# Altium integrated library ARC_Int_Lib.IntLib: 107 symbols (part 3 of 3)
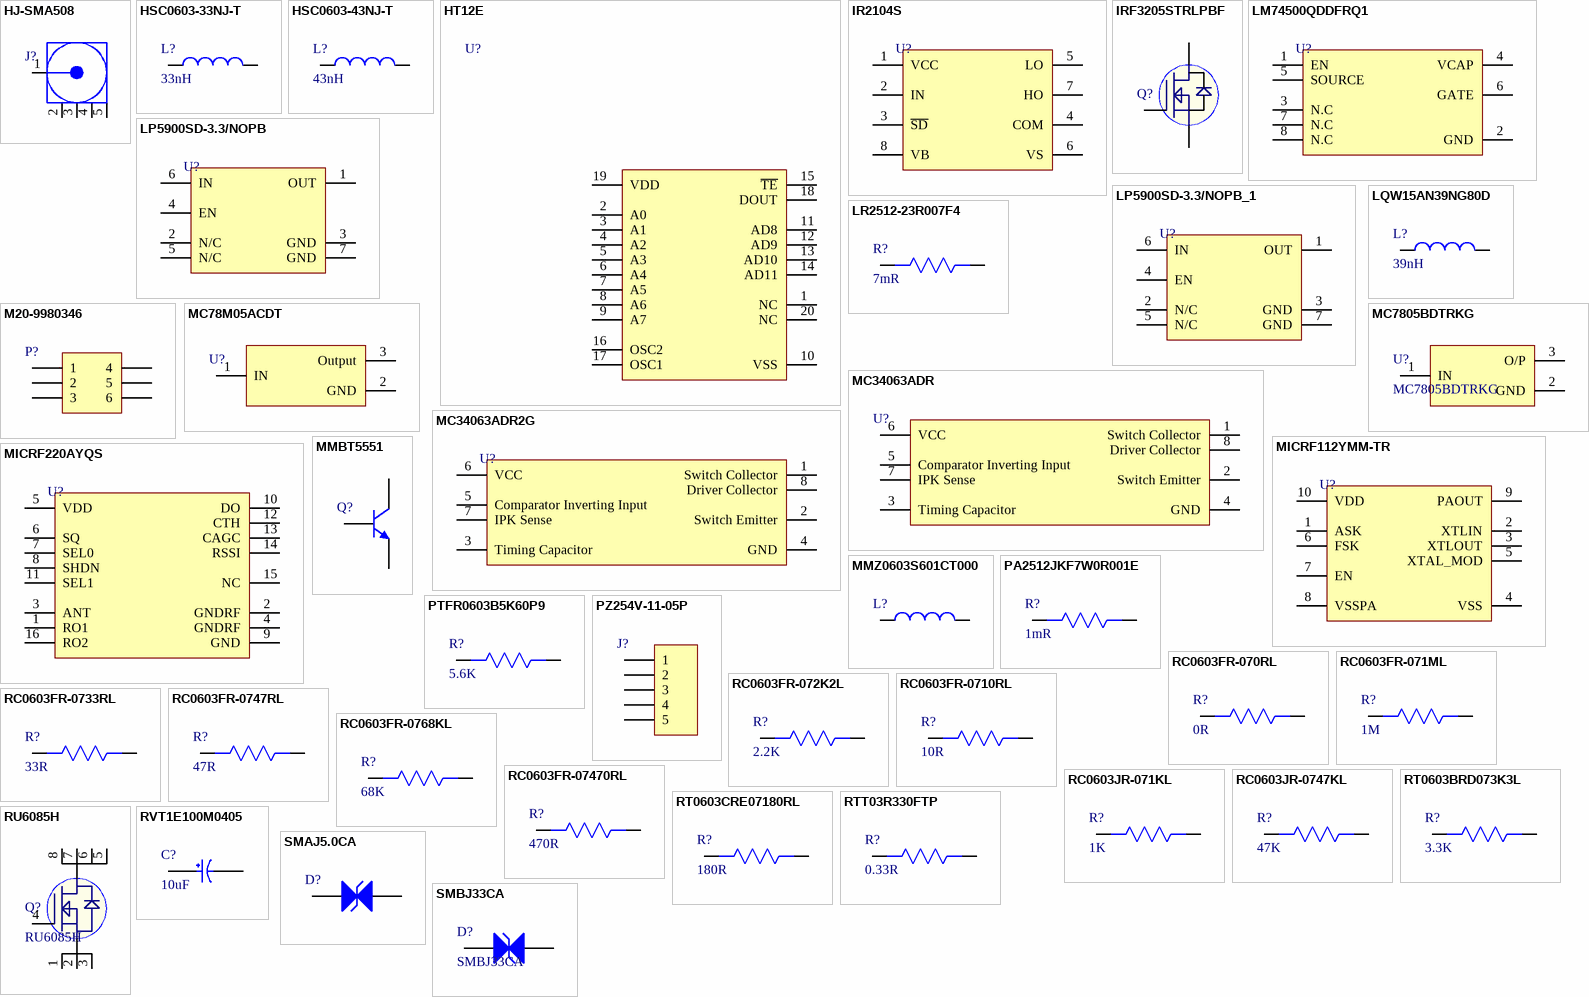
[diagram p4: symbols HJ-SMA508 to SMBJ33CA]

## RC0603FR-0768KL
designator R?, comment 68K
RES SMD 68K OHM 5% 1/10W 0603; Manufacturer: Yageo; Manufacturer Part Number: RC0603FR-0768KL; Power Rating: 100mW; Resistance: 68kR; Tolerance: 1%; Voltage Rating: 50V; Temperature Coefficient: 100ppm/°C; Supplier 1: Mouser; RoHS: Yes; Category: Chip SMD Resistors; Stock 1: 294889; Pricing 1: 1=0.10000, 10=0.01700, 50=0.01700, 100=0.00700, 1000=0.00400, 10000=0.00200 (USD); Case/Package: 0603; Number of Pins: 2; Case Code (Metric): 1608; Case Code (Imperial): 0603; Size Code: 0603; Min Operating Temperature: -55°C; Max Operating Temperature: 155°C; Package Quantity: 1; Packaging: Tape and Reel; Voltage Rating (DC): 50V; Resistor Type: Thick Film; Number of Terminations: 2; Termination: SMD/SMT; Max Power Dissipation: 100mW; Features: Moisture Resistant; Series: RC; Resistance Tolerance: 1%; Technology: THICK FILM; Length: 0.063inch; Width: 0.031inch; Height: 0.022inch; Depth: 0.8mm; RoHS Compliant: Yes; REACH SVHC: Unknown; Lead Free: Lead Free; ComponentLink1URL: https://datasheet.ciiva.com/11819/0900766b80f96399-11819412.pdf?src-supplier=RSComponents; ComponentLink1Description: https://datasheet.ciiva.com/11819/0900766b80f96399-11819412.pdf?src-supplier=RSComponents; ComponentLink2URL: https://datasheet.ciiva.com/7983/443971-7983658.pdf?src-supplier=Element14; ComponentLink2Description: https://datasheet.ciiva.com/7983/443971-7983658.pdf?src-supplier=Element14; ComponentLink3URL: https://datasheet.ciiva.com/46412/443971-46412855.pdf?src-supplier=Element14; ComponentLink3Description: https://datasheet.ciiva.com/46412/443971-46412855.pdf?src-supplier=Element14; ComponentLink4URL: https://datasheet.ciiva.com/2454/pyu-r-int-thick-7-2454148.pdf?src-supplier=Digi-Key; ComponentLink4Description: https://datasheet.ciiva.com/2454/pyu-r-int-thick-7-2454148.pdf?src-supplier=Digi-Key; ComponentLink5URL: https://datasheet.ciiva.com/2454/pyu-r-int-thick-7-2454149.pdf?src-supplier=Digi-Key; ComponentLink5Description: https://datasheet.ciiva.com/2454/pyu-r-int-thick-7-2454149.pdf?src-supplier=Digi-Key; ComponentLink6URL: https://datasheet.ciiva.com/2454/pyu-r-int-thick-7-2454147.pdf?src-supplier=Digi-Key; ComponentLink6Description: https://datasheet.ciiva.com/2454/pyu-r-int-thick-7-2454147.pdf?src-supplier=Digi-Key; ComponentLink7URL: https://datasheet.ciiva.com/7746/443971-7746391.pdf?src-supplier=Element14; ComponentLink7Description: https://datasheet.ciiva.com/7746/443971-7746391.pdf?src-supplier=Element14; ComponentLink8URL: https://datasheet.ciiva.com/7746/443971-7746390.pdf?src-supplier=Element14; ComponentLink8Description: https://datasheet.ciiva.com/7746/443971-7746390.pdf?src-supplier=Element14; Supplier Part Number 1: 603-RC0603FR-0768KL
footprint Res0603
pins: 1, 2

## RC0603FR-07470RL
designator R?, comment 470R
RES SMD 470 OHM 1% 1/10W 0603; Manufacturer: Yageo; Manufacturer Part Number: RC0603FR-07470RL; Power Rating: 100mW; Voltage Rating: 50V; Temperature Coefficient: 100ppm/°C; Working Voltage: 75V; Supplier 1: Digi-Key; Stock 1: 4530601; Pricing 1: 1=0.1, 10=0.023, 100=0.0094, 1000=0.00421, 2500=0.00366 (USD); Case/Package: 0603; Case Code (Metric): 1608; Case Code (Imperial): 0603; Min Operating Temperature: -55°C; Max Operating Temperature: 155°C; Tolerance: 1%; Resistance: 470R; Packaging: Tape and Reel; Package Quantity: 1; Composition: Thick Film; Number of Terminations: 2; Termination: SMD/SMT; Military Standard: Not; Max Power Dissipation: 100mW; Features: Moisture Resistant; Length: 1.6mm; Height: 0.022inch; Width: 0.031inch; Depth: 0.8mm; REACH SVHC: No SVHC; Lead Free: Lead Free; ComponentLink1URL: http://documents.rs-components.com/techlib://itc_doclist_GB.htm?stockno=5047341&src-supplier=RSComponents; ComponentLink1Description: http://documents.rs-components.com/techlib://itc_doclist_GB.htm?stockno=5047341&src-supplier=RSComponents; ComponentLink2URL: http://www.farnell.com/datasheets/1868787.pdf?src-supplier=Element14; ComponentLink2Description: http://www.farnell.com/datasheets/1868787.pdf?src-supplier=Element14; ComponentLink3URL: http://www.farnell.com/datasheets/2167052.pdf?src-supplier=Element14; ComponentLink3Description: http://www.farnell.com/datasheets/2167052.pdf?src-supplier=Element14; ComponentLink4URL: http://www.yageo.com/documents/recent/PYu-RC_Group_51_RoHS_L_10.pdf?src-supplier=Digi-Key; ComponentLink4Description: http://www.yageo.com/documents/recent/PYu-RC_Group_51_RoHS_L_10.pdf?src-supplier=Digi-Key; Supplier Part Number 1: 311-470HRCT-ND
footprint Res0603
pins: 1, 2

## RC0603JR-071KL
designator R?, comment 1K
RES SMD 1K OHM 5% 1/10W 0603; Manufacturer: Yageo; Manufacturer Part Number: RC0603JR-071KL; Resistance: 1kR; Temperature Coefficient: 100ppm/°C; Voltage Rating (DC): 50V; Power Rating: 100mW; Supplier 1: Digi-Key; Stock 1: 12490655; Pricing 1: 1=0.1, 10=0.018, 100=0.0072, 1000=0.00323, 2500=0.00281 (USD); Case/Package: 0603; Number of Pins: 2; Contact Plating: Tin,Matte; Case Code (Imperial): 0603; Case Code (Metric): 1608; Min Operating Temperature: -55°C; Max Operating Temperature: 155°C; Tolerance: 5%; Composition: Thick Film; Packaging: Tape and Reel; Package Quantity: 5000; Voltage Rating: 50V; Termination: SMD/SMT; Military Standard: Not; Length: 1.6mm; Height: 0.45mm; Width: 0.8mm; Depth: 0.8mm; Radiation Hardening: No; REACH SVHC: Unknown; Lead Free: Lead Free; ComponentLink1URL: http://www.yageo.com/documents/recent/PYu-RC_Group_51_RoHS_L_2.pdf?src-supplier=Avnet; ComponentLink1Description: http://www.yageo.com/documents/recent/PYu-RC_Group_51_RoHS_L_2.pdf?src-supplier=Avnet; ComponentLink2URL: http://www.farnell.com/datasheets/2167052.pdf?src-supplier=Element14; ComponentLink2Description: http://www.farnell.com/datasheets/2167052.pdf?src-supplier=Element14; ComponentLink3URL: http://www.farnell.com/datasheets/443971.pdf?src-supplier=Element14; ComponentLink3Description: http://www.farnell.com/datasheets/443971.pdf?src-supplier=Element14; ComponentLink4URL: http://www.farnell.com/datasheets/1868787.pdf?src-supplier=Element14; ComponentLink4Description: http://www.farnell.com/datasheets/1868787.pdf?src-supplier=Element14; Supplier Part Number 1: 311-1.0KGRCT-ND
footprint Res0603
pins: 1, 2

## RC0603JR-0747KL
designator R?, comment 47K
RES SMD 47K OHM 5% 1/10W 0603; Manufacturer: Yageo; Manufacturer Part Number: RC0603JR-0747KL; Resistance: 47kR; Power Rating: 100mW; Voltage Rating (DC): 50V; Temperature Coefficient: 100ppm/°C; Supplier 1: Arrow; Stock 1: 599135; Pricing 1: 5000=0.0025, 10000=0.0022, 25000=0.0019, 1=0.0011, 6000=0.001 (USD); Case/Package: 0603; Number of Pins: 2; Case Code (Imperial): 0603; Case Code (Metric): 1608; Min Operating Temperature: -55°C; Max Operating Temperature: 155°C; Packaging: Tape and Reel; Tolerance: 5%; Voltage Rating: 50V; Package Quantity: 5000; Termination: SMD/SMT; Military Standard: Not; Composition: Thick Film; Length: 1.6mm; Height: 0.45mm; Width: 0.8mm; Depth: 0.8mm; REACH SVHC: No SVHC; Lead Free: Lead Free; ComponentLink1URL: http://www.farnell.com/datasheets/443971.pdf; ComponentLink1Description: http://www.farnell.com/datasheets/443971.pdf; ComponentLink2URL: http://www.mouser.com/catalog/specsheets/RC0603.pdf; ComponentLink2Description: http://www.mouser.com/catalog/specsheets/RC0603.pdf; Supplier Part Number 1: RC0603JR-0747KL
footprint Res0603
pins: 1, 2

## RT0603BRD073K3L
designator R?, comment 3.3K
RES SMD 3.3K OHM 0.1% 1/10W 0603; Manufacturer: Yageo; Manufacturer Part Number: RT0603BRD073K3L; Resistance: 3.3kR; Power Rating: 100mW; Voltage Rating: 75V; Temperature Coefficient: 25ppm/°C; Voltage Rating (DC): 50V; Supplier 1: Newark; RoHS: Yes; Category: Chip SMD Resistors; Stock 1: 7026; Pricing 1: 1=0.26300, 10=0.16400, 25=0.12800, 50=0.09300, 100=0.05700 (USD); Case/Package: 0603; Case Code (Metric): 1608; Case Code (Imperial): 0603; Contact Plating: Tin,Lead; Min Operating Temperature: -55°C; Max Operating Temperature: 125°C; Package Quantity: 5000; Packaging: Tape and Reel; Tolerance: 0.1%; Resistor Type: Thin Film; Number of Terminations: 2; Termination: SMD/SMT; Max Power Dissipation: 100mW; Features: Moisture Resistant; Series: RT; Construction: Rectangular; Length: 0.063inch; Width: 0.031inch; Height: 0.022inch; Depth: 0.8mm; Military Standard: Not; Lead Free: Lead Free; RoHS Compliant: Yes; ComponentLink1URL: https://datasheet.ciiva.com/11814/0900766b8027bd26-11814026.pdf?src-supplier=RSComponents; ComponentLink1Description: https://datasheet.ciiva.com/11814/0900766b8027bd26-11814026.pdf?src-supplier=RSComponents; ComponentLink2URL: https://datasheet.ciiva.com/2585/pyu-rt-1-to-0-05-rohs-l-4-2585926.pdf?src-supplier=Digi-Key; ComponentLink2Description: https://datasheet.ciiva.com/2585/pyu-rt-1-to-0-05-rohs-l-4-2585926.pdf?src-supplier=Digi-Key; ComponentLink3URL: https://datasheet.ciiva.com/12694/pyu-rt-1-to-0-05-rohs-l-4-12694839.pdf?src-supplier=Mouser; ComponentLink3Description: https://datasheet.ciiva.com/12694/pyu-rt-1-to-0-05-rohs-l-4-12694839.pdf?src-supplier=Mouser; Supplier Part Number 1: 82AH8918
footprint Res0603
pins: 1, 2

## RT0603CRE07180RL
designator R?, comment 180R
100mW Thin Film Resistor 75V ±0.25% ±50ppm/℃ 180Ω -55℃~+155℃ 0603 Chip Resistor - Surface Mount ROHS; Manufacturer: YAGEO; Manufacturer Part Number: RT0603CRE07180RL; ComponentLink1Description: LCSC; ComponentLink1URL: https://lcsc.com/product-detail/Chip-span-style-background-color-ff0-Resistor-span-Surface-Mount_YAGEO-RT0603CRE07180RL_C705909.html; Footprint: 0603
footprint Res0603
pins: 1, 2

## RTT03R330FTP
designator R?, comment 0.33R
±1% 1/10W Thick Film Resistors 75V ±600ppm/℃ -55℃~+155℃ 0.33Ω 0603 Chip Resistor - Surface Mount ROHS; Manufacturer: RALEC; Manufacturer Part No: RTT03R330FTP; Value: 0.33Ω; Package: 0603
footprint Res0603
pins: 1, 2

## RU6085H
designator Q?
60V 80A 2.5W 7mΩ@10V,20A 3V@250μA N Channel SOP-8_150mil MOSFETs ROHS; Manufacturer: Shenzhen; Manufacturer Part No: RU6085H; Package: SOP-8_150mil; ComponentLink1Description: LCSC; ComponentLink1URL: https://lcsc.com/product-detail/MOSFETs_Shenzhen-ruichips-Semicon-RU6085H_C181990.html
footprint RU6085H
pins: 1 S, 2 S, 3 S, 4 G, 5 D, 6 D, 7 D, 8 D

## RVT1E100M0405
designator C?, comment 10uF
CAP ALUM 10uF 25V SMD; Manufacturer: ROQANG; φD: 4mm; L: 5.4mm; Tolerance: ±20%; Operating Temperature: -45℃~+105℃; Rated Voltage: 25V; Capacitance: 10uF
footprint RVT1E100M0405. (10uF 25V 5.4mm SMD)
pins: 1, 2

## SMAJ5.0CA
designator D?
43.5A 9.2V 6.4V 5V Bi-Directional SMA(DO-214AC) TVS ROHS; Manufacturer: Bourns; Manufacturer Part Number: SMAJ5.0CA; Breakdown Voltage: 7V; Polarity: Bidirectional; Peak Pulse Power: 400W; Test Current: 10mA; Element Configuration: Single; Max Surge Current: 40A; Max Reverse Leakage Current: 1.6mA; Number of Channels: 1; Power Line Protection: No; Diode Type: ZENER; ESD Protection: Yes; Supplier 1: RSComponents; RoHS: Yes; Category: TVS Diodes; Stock 1: 4825; Pricing 1: 5000=0.16400, 10000=0.16000, 15000=0.15600 (GBP); Mount: Surface Mount; Case/Package: DO-214AC; Number of Pins: 2; Contact Plating: Tin; Min Operating Temperature: -55°C; Max Operating Temperature: 150°C; Reverse Standoff Voltage: 5V; Clamping Voltage: 9.2V; Direction: Bidirectional; Packaging: Tape and Reel; Min Breakdown Voltage: 6.4V; Peak Pulse Current: 43.5A; Package Quantity: 1; Operating Supply Voltage: 5V; Max Power Dissipation: 400W; Termination: SMD/SMT; Reverse Breakdown Voltage: 6.4V; Max Breakdown Voltage: 7V; Number of Elements: 1; Leakage Current: 1.6mA; Number of Bidirectional Channels: 1; Resistor Type: Zener; Series: SMAJ; Radiation Hardening: No; RoHS Compliant: Yes; REACH SVHC: No SVHC; ComponentLink1URL: https://datasheet.ciiva.com/11336/smaj-11336795.pdf?src-supplier=Avnet; ComponentLink1Description: https://datasheet.ciiva.com/11336/smaj-11336795.pdf?src-supplier=Avnet; ComponentLink2URL: https://datasheet.ciiva.com/3022/smaj-3022286.pdf?src-supplier=Avnet; ComponentLink2Description: https://datasheet.ciiva.com/3022/smaj-3022286.pdf?src-supplier=Avnet; ComponentLink3URL: https://datasheet.ciiva.com/334/smaj-334523.pdf?src-supplier=Digi-Key; ComponentLink3Description: https://datasheet.ciiva.com/334/smaj-334523.pdf?src-supplier=Digi-Key; ComponentLink4URL: https://datasheet.ciiva.com/334/smaj-334524.pdf?src-supplier=Digi-Key; ComponentLink4Description: https://datasheet.ciiva.com/334/smaj-334524.pdf?src-supplier=Digi-Key; ComponentLink5URL: https://datasheet.ciiva.com/334/smaj-334522.pdf?src-supplier=Digi-Key; ComponentLink5Description: https://datasheet.ciiva.com/334/smaj-334522.pdf?src-supplier=Digi-Key; ComponentLink6URL: https://datasheet.ciiva.com/30090/smaj-30090141.pdf?src-supplier=Onlinecomponents.com; ComponentLink6Description: https://datasheet.ciiva.com/30090/smaj-30090141.pdf?src-supplier=Onlinecomponents.com; ComponentLink7URL: https://datasheet.ciiva.com/17413/smaj-17413550.pdf?; ComponentLink7Description: https://datasheet.ciiva.com/17413/smaj-17413550.pdf?; Supplier Part Number 1: 1742481
footprint SMA
pins: 1 A, 2 A

## SMBJ33CA
designator D?
11.3A 53.3V 36.7V 33V Bi-Directional SMB(DO-214AA) TVS ROHS; Manufacturer: Brightking Elec (TAIWAN); Package: DO-124AA; Maximum Clamping Voltage: 53.3V; Breakdown Voltage (Min): 36.7V; Reverse Stand-Off Voltage (Vrwm): 33V; Polarity: Bi-directional
footprint SMBJ33CA (11.3A 53.3V 36.7V 33V Bi-Directional SMB(DO-214AA) TVS ROHS)
pins: 1 A1, 2 A2

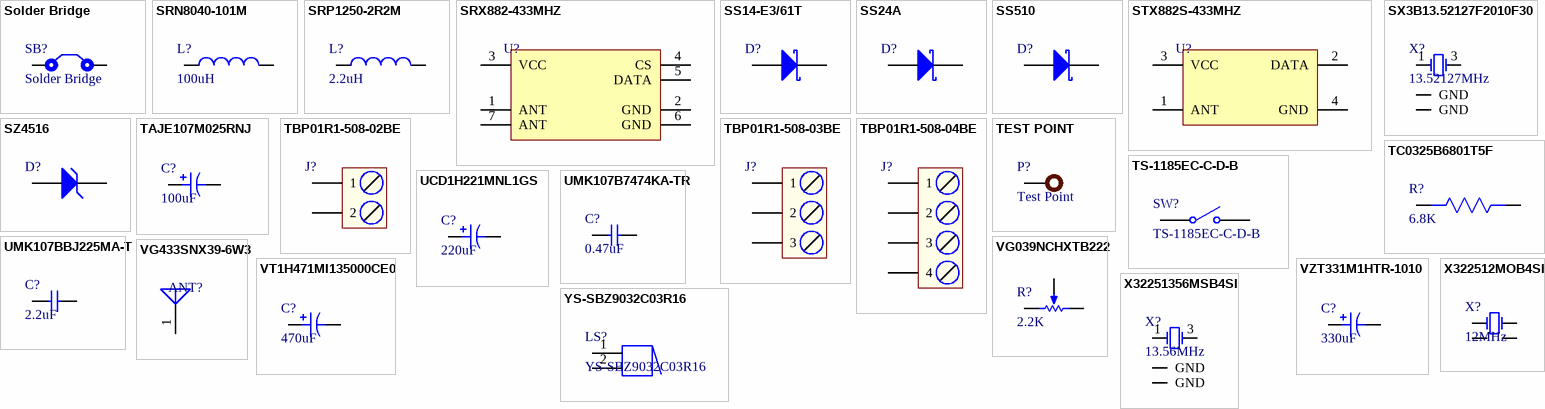
[diagram p2: symbols Solder Bridge to YS-SBZ9032C03R16]

## Solder Bridge
designator SB?
Solder Bridge ON
footprint Solder Bridge (Solder Bridge ON)
pins: 1, 2

## SRN8040-101M
designator L?, comment 100uH
FIXED IND 100UH 1A 400 MOHM SMD; Manufacturer: Bourns; Manufacturer Part Number: SRN8040-101M; Core Material: Ferrite; Material: Steel; Inductance Tolerance: 20%; Shielding: Shielded; DC Resistance (DCR): 400mR; Self Resonant Frequency: 6MHz; Test Frequency: 100kHz; Supplier 1: Arrow Electronics; RoHS: Yes; Category: Fixed Inductors; Stock 1: 70; Pricing 1: 1=0.74330, 10=0.57270, 25=0.52540 (USD); Mount: Surface Mount; Case/Package: Nonstandard; Number of Pins: 2; Weight: 0.028607oz; Min Operating Temperature: -40°C; Max Operating Temperature: 125°C; Package Quantity: 1000; Packaging: Tape and Reel; Tolerance: 20%; Inductance: 100uH; Current Rating: 1A; Saturation Current: 1A; Max DC Current: 1A; Termination: SMD/SMT; Resistor Type: Wirewound; RMS Current (Irms): 1A; DC Current: 1A; Series: SRN8040; Sample Rate (Hz): 100kHz; Length: 8mm; Width: 8mm; Height: 4mm; Height - Seated (Max): 0.157inch; Depth: 8.3mm; REACH SVHC: No SVHC; Military Standard: Not; RoHS Compliant: Yes; ComponentLink1URL: https://datasheet.ciiva.com/11802/0900766b80fe1f3f-11802577.pdf?src-supplier=RSComponents; ComponentLink1Description: https://datasheet.ciiva.com/11802/0900766b80fe1f3f-11802577.pdf?src-supplier=RSComponents; ComponentLink2URL: https://datasheet.ciiva.com/1049/srn8040-1049477.pdf?src-supplier=Digi-Key; ComponentLink2Description: https://datasheet.ciiva.com/1049/srn8040-1049477.pdf?src-supplier=Digi-Key; ComponentLink3URL: https://datasheet.ciiva.com/1049/srn8040-1049478.pdf?src-supplier=Digi-Key; ComponentLink3Description: https://datasheet.ciiva.com/1049/srn8040-1049478.pdf?src-supplier=Digi-Key; ComponentLink4URL: https://datasheet.ciiva.com/7849/1695391-7849526.pdf?src-supplier=Element14; ComponentLink4Description: https://datasheet.ciiva.com/7849/1695391-7849526.pdf?src-supplier=Element14; ComponentLink5URL: https://datasheet.ciiva.com/28561/1733536-28561112.pdf?src-supplier=Element14; ComponentLink5Description: https://datasheet.ciiva.com/28561/1733536-28561112.pdf?src-supplier=Element14; ComponentLink6URL: https://datasheet.ciiva.com/6689/srn8040-6689481.pdf?src-supplier=Digi-Key; ComponentLink6Description: https://datasheet.ciiva.com/6689/srn8040-6689481.pdf?src-supplier=Digi-Key; ComponentLink7URL: https://datasheet.ciiva.com/8515/srn8040-8515246.pdf?src-supplier=Avnet; ComponentLink7Description: https://datasheet.ciiva.com/8515/srn8040-8515246.pdf?src-supplier=Avnet; Supplier Part Number 1: SRN8040-101M
footprint SRN8040-101M
pins: 1, 2

## SRP1250-2R2M
designator L?, comment 2.2uH
FIXED IND 2.2UH 20A 5.5 MOHM SMD; Manufacturer: Bourns; Manufacturer Part Number: SRP1250-2R2M; Core Material: Ferrite; Tolerance: 20%; Saturation Current: 32A; Shielding: Shielded; DC Resistance (DCR): 5.5mR; Test Frequency: 100kHz; Supplier 1: Arrow Electronics; RoHS: Yes; Category: Fixed Inductors; Stock 1: 3910; Pricing 1: 1=1.81070, 10=1.68150, 25=1.41460, 100=1.18300, 250=1.03970, 500=0.94900, 1000=0.87930, 3000=0.82920 (USD); Mount: Surface Mount; Case/Package: 1250; Material: Ferrite; Min Operating Temperature: -55°C; Max Operating Temperature: 150°C; Packaging: Tape and Reel; Package Quantity: 1; Inductance Tolerance: 20%; Inductance: 2.2uH; Current Rating: 20A; Max DC Current: 20A; Termination: SMD/SMT; Resistor Type: Wirewound; RMS Current (Irms): 20A; DC Current: 20A; Series: SRP1250; Sample Rate (Hz): 100kHz; Length: 13.9mm; Width: 13.5mm; Height: 5.9mm; Height - Seated (Max): 0.232inch; Depth: 13.5mm; Radiation Hardening: No; REACH SVHC: No SVHC; Military Standard: Not; RoHS Compliant: Yes; ComponentLink1URL: https://datasheet.ciiva.com/5850/1771759-5850976.pdf?src-supplier=Farnell; ComponentLink1Description: https://datasheet.ciiva.com/5850/1771759-5850976.pdf?src-supplier=Farnell; ComponentLink2URL: https://datasheet.ciiva.com/22704/1834358-22704149.pdf?src-supplier=Element14; ComponentLink2Description: https://datasheet.ciiva.com/22704/1834358-22704149.pdf?src-supplier=Element14; ComponentLink3URL: https://datasheet.ciiva.com/6690/srp1250-6690108.pdf?src-supplier=Digi-Key; ComponentLink3Description: https://datasheet.ciiva.com/6690/srp1250-6690108.pdf?src-supplier=Digi-Key; ComponentLink4URL: https://datasheet.ciiva.com/6690/srp1250-6690109.pdf?src-supplier=Digi-Key; ComponentLink4Description: https://datasheet.ciiva.com/6690/srp1250-6690109.pdf?src-supplier=Digi-Key; ComponentLink5URL: https://datasheet.ciiva.com/7849/1834358-7849549.pdf?src-supplier=Element14; ComponentLink5Description: https://datasheet.ciiva.com/7849/1834358-7849549.pdf?src-supplier=Element14; ComponentLink6URL: https://datasheet.ciiva.com/6690/srp1250-6690110.pdf?src-supplier=Digi-Key; ComponentLink6Description: https://datasheet.ciiva.com/6690/srp1250-6690110.pdf?src-supplier=Digi-Key; ComponentLink7URL: https://datasheet.ciiva.com/48690/001056474-da-01-en-mag-abg-hc-l-ind-srp1250-2r2m-2-2uh-48690438.pdf?src-supplier=Conrad; ComponentLink7Description: https://datasheet.ciiva.com/48690/001056474-da-01-en-mag-abg-hc-l-ind-srp1250-2r2m-2-2uh-48690438.pdf?src-supplier=Conrad; Supplier Part Number 1: SRP1250-2R2M
footprint SRP1250-2R2M
pins: 1, 2

## SRX882-433MHZ
designator U?
RF Modules ROHS; Manufacturer: G-NiceRF; Manufacturer Part Number: SRX882-433MHZ; LCSC Part Number: C5126754; ComponentLink1Description: LCSC; ComponentLink1URL: https://www.lcsc.com/product-detail/RF-Modules_G-NiceRF-STX882S-433MHZ-SRX882-433MHZ-SW433-TH32_C5126754.html
footprint SRX882-433MHZ
pins: 1 ANT, 2 GND, 3 VCC, 4 CS, 5 DATA, 6 GND, 7 ANT

## SS14-E3/61T
designator D?
40V 500mV@1A 1A SMA(DO-214AC) Schottky Barrier Diodes (SBD) ROHS; Manufacturer: Vishay Semiconductors; Manufacturer Part Number: SS14-E3/61T; Forward Voltage: 500mV; Max Reverse Current: 200uA; Element Configuration: Single; Peak Non-Repetitive Surge Current: 40A; Polarity: Standard; Supplier 1: Arrow Electronics; RoHS: Yes; Category: Rectifier Diodes; Stock 1: 100; Pricing 1: 1=0.14040, 10=0.13900, 25=0.11710, 100=0.10990 (USD); Mount: Surface Mount; Case/Package: SMA; Number of Pins: 2; Contact Plating: Tin,Matte; Min Operating Temperature: -65°C; Max Operating Temperature: 125°C; Packaging: Tape and Reel; Forward Current: 1A; Max Repetitive Reverse Voltage (Vrrm): 40V; Max Forward Surge Current (Ifsm): 40A; Voltage Rating (DC): 40V; Current Rating: 1A; Output Current: 1A; Max Surge Current: 40A; Package Quantity: 1; Max Reverse Leakage Current: 200uA; Average Rectified Current: 1A; Current: 1A; Voltage: 40V; Max Reverse Voltage (DC): 40V; Series: -; Termination: SMD/SMT; Length: 4.6mm; Width: 2.9mm; Radiation Hardening: No; Lead Free: Lead Free; REACH SVHC: Unknown; Supplier Part Number 1: SS14-E3/61T
footprint SMA
pins: 1 K, 2 A

## SS24A
designator D?
40V 500mV@2A 2A SMA(DO-214AC) Schottky Barrier Diodes (SBD) ROHS; Manufacturer: Yangzhou; Manufacturer Part Number: SS24A; Package: SMA(DO-214AC); ComponentLink1Description: LCSC; ComponentLink1URL: *
footprint SMA
pins: 1 K, 2 A

## SS510
designator D?
300μA@100V 100V Single 5A 850mV@5A SMB Schottky Barrier Diodes (SBD) ROHS; Manufacturer: YFW; Manufacturer Part Number: SS510; Footprint: SMB; ComponentLink1Description: LCSC; ComponentLink1URL: https://lcsc.com/product-detail/Schottky-Barrier-Diodes-SBD_YFW-SS510_C2898359.html
footprint SMB
pins: 1 K, 2 A

## STX882S-433MHZ
designator U?
RF Modules ROHS; Manufacturer: G-NiceRF; Manufacturer Part Number: STX882S-433MHZ; LCSC Part Number: C5126754; ComponentLink1Description: LCSC; ComponentLink1URL: https://www.lcsc.com/product-detail/RF-Modules_G-NiceRF-STX882S-433MHZ-SRX882-433MHZ-SW433-TH32_C5126754.html
footprint STX882S-433MHZ
pins: 1 ANT, 2 DATA, 3 VCC, 4 GND

## SX3B13.52127F2010F30
designator X?, comment 13.52127MHz
13.52127MHz SMD Crystal Resonator 20pF 80Ω ±10ppm ±30ppm -40℃~+85℃ SMD3225-4P Crystals ROHS; Manufacturer: Shenzhen; Manufacturer Part Number: SX3B13.52127F2010F30; Value: 13.52127MHz; ComponentLink1Description: LCSC; ComponentLink1URL: https://www.lcsc.com/product-detail/Crystals_Shenzhen-SCTF-Elec-SX3B13-52127F2010F30_C2901658.html
footprint SX3B13.52127F2010F30
pins: 1 OSC1, 2 GND, 3 OSC2, 4 GND

## SZ4516
designator D?
500nA@12.2V ±5% 8Ω Single 2W 16V SMA Zener Diodes ROHS; Manufacturer: LGE; Manufacturer Part Number: SZ4516; Footprint: SMA; ComponentLink1Description: LCSC; ComponentLink1URL: https://lcsc.com/product-detail/span-style-background-color-ff0-Zener-span-Diodes_LGE-SZ4516_C2903793.html
footprint SMA
pins: 1 K, 2 A

## TAJE107M025RNJ
designator C?, comment 100uF
CAP TANT 100UF 20% 25V 2917; Manufacturer: Kyocera AVX; Manufacturer Part Number: TAJE107M025RNJ; ESR (Equivalent Series Resistance): 300mR; Leakage Current: 25uA; Polarity: Polar; Dissipation Factor: 10%; Supplier 1: Mouser; RoHS: Yes; Category: Tantalum Capacitors; Stock 1: 109; Pricing 1: 1=2.81000, 10=2.81000, 50=2.81000, 100=2.19000, 1000=1.76000, 10000=1.76000 (USD); Mount: Surface Mount; Case/Package: 2917; Number of Pins: 2; Case Code (Imperial): 2917; Case Code (Metric): 7343; Min Operating Temperature: -55°C; Max Operating Temperature: 125°C; Capacitance: 100uF; Tolerance: 20%; Packaging: Tape and Reel; Voltage Rating: 25V; Voltage Rating (DC): 25V; Features: General Purpose; Package Quantity: 1; Termination: SMD/SMT; Series: TAJ; Construction: Flat; Length: 7.3mm; Width: 4.3mm; Height: 4.3mm; Depth: 4.3mm; Height - Seated (Max): 0.169inch; Radiation Hardening: No; Lead Free: Lead Free; RoHS Compliant: Yes; REACH SVHC: No SVHC; ComponentLink1URL: https://datasheet.ciiva.com/26787/taje107m025rnj-26787048.pdf?src-supplier=IIIC; ComponentLink1Description: https://datasheet.ciiva.com/26787/taje107m025rnj-26787048.pdf?src-supplier=IIIC; ComponentLink2URL: https://datasheet.ciiva.com/265/taj-265541.pdf?src-supplier=Digi-Key; ComponentLink2Description: https://datasheet.ciiva.com/265/taj-265541.pdf?src-supplier=Digi-Key; ComponentLink3URL: https://datasheet.ciiva.com/265/taj-265542.pdf?src-supplier=Digi-Key; ComponentLink3Description: https://datasheet.ciiva.com/265/taj-265542.pdf?src-supplier=Digi-Key; ComponentLink4URL: https://datasheet.ciiva.com/265/taj-265540.pdf?src-supplier=Digi-Key; ComponentLink4Description: https://datasheet.ciiva.com/265/taj-265540.pdf?src-supplier=Digi-Key; ComponentLink5URL: https://datasheet.ciiva.com/28609/1719052-28609254.pdf?src-supplier=Element14; ComponentLink5Description: https://datasheet.ciiva.com/28609/1719052-28609254.pdf?src-supplier=Element14; ComponentLink6URL: https://datasheet.ciiva.com/11230/taj-11230456.pdf?src-supplier=Avnet; ComponentLink6Description: https://datasheet.ciiva.com/11230/taj-11230456.pdf?src-supplier=Avnet; ComponentLink7URL: https://datasheet.ciiva.com/17339/taj-17339677.pdf?src-supplier=Avnet+Europe; ComponentLink7Description: https://datasheet.ciiva.com/17339/taj-17339677.pdf?src-supplier=Avnet+Europe; ComponentLink8URL: https://datasheet.ciiva.com/22667/1719052-22667581.pdf?src-supplier=Element14; ComponentLink8Description: https://datasheet.ciiva.com/22667/1719052-22667581.pdf?src-supplier=Element14; Supplier Part Number 1: 581-TAJE107M025RNJ
footprint CAP- 2917
pins: 1, 2

## TBP01R1-508-02BE
designator J?
TERMINAL BLOCK, PLUGGABLE, 5.08,; Manufacturer: CUI Devices; Manufacturer Part Number: TBP01R1-508-02BE; Supplier 1: Arrow Electronics; RoHS: Yes; Category: Terminal Blocks; Stock 1: 1821; Pricing 1: 1=0.57450, 10=0.23530, 25=0.18730, 50=0.17170, 100=0.16040, 400=0.14010, 800=0.12060, 1200=0.11290 (USD); Supplier Part Number 1: TBP01R1-508-02BE
footprint TBP01R1-508-02BE
pins: 1, 2

## TBP01R1-508-03BE
designator J?
TERMINAL BLOCK, PLUGGABLE, 5.08,; Manufacturer: CUI Devices; Manufacturer Part Number: TBP01R1-508-03BE; Supplier 1: Arrow Electronics; RoHS: Yes; Category: Terminal Blocks; Stock 1: 2069; Pricing 1: 1=0.52380, 10=0.21370, 100=0.18450, 600=0.17070 (USD); Supplier Part Number 1: TBP01R1-508-03BE
footprint TBP01R1-508-03BE
pins: 1, 2, 3

## TBP01R1-508-04BE
designator J?
TERMINAL BLOCK, PLUGGABLE, 5.08,; Manufacturer: CUI Devices; Manufacturer Part Number: TBP01R1-508-04BE; Supplier 1: Arrow Electronics; RoHS: Yes; Category: Terminal Blocks; Stock 1: 697; Pricing 1: 1=0.77380, 10=0.29040, 25=0.28750, 50=0.25070, 200=0.24820, 400=0.24580, 600=0.22570 (USD); Supplier Part Number 1: TBP01R1-508-04BE
footprint TBP01R1-508-04BE
pins: 1, 2, 3, 4

## TC0325B6801T5F
designator R?, comment 6.8K
6.8kΩ 0603 Chip Resistor - Surface Mount ROHS; Manufacturer: UNI-ROYAL; Manufacturer Part Number: TC0325B6801T5F; Footprint: 0603; ComponentLink1Description: LCSC; ComponentLink1URL: https://lcsc.com/product-detail/Chip-span-style-background-color-ff0-Resistor-span-Surface-Mount_UNI-ROYAL-Uniroyal-Elec-TC0325B6801T5F_C2982989.html
footprint Res0603
pins: 1, 2

## TEST POINT
designator P?, comment Test Point
Test Point ON
footprint TEST POINT
pins: 1

## TS-1185EC-C-D-B
designator SW?
3mm 2mm Round Button 50mA Top3.65mm SPST 12V SMD Tactile Switches; Manufacturer: XKB; Manufacturer Part No: TS-1185EC-C-D-B; Package: Custom; ComponentLink1Description: LCSC; ComponentLink1URL: https://lcsc.com/product-detail/Tactile-Switches_XKB-Connectivity-TS-1185EC-C-D-B_C318893.html
footprint TS-1185EC-C-D-B
pins: 1, 2

## UCD1H221MNL1GS
designator C?, comment 220uF
CAP ALUM 220UF 20% 50V SMD; Manufacturer: Nichicon; Manufacturer Part Number: UCD1H221MNL1GS; Ripple Current: 700mA; Impedance: 160mR; Leakage Current: 3uA; Life (Hours): 5000Hour; Dissipation Factor: 0.1%; Supplier 1: Digi-Key; RoHS: Yes; Category: Aluminum Electrolytic Capacitors; Pricing 1: 1=0.85000, 10=0.60200, 50=0.45480, 100=0.39620 (USD); Mount: Surface Mount,PCB; Case/Package: Radial; Min Operating Temperature: -55°C; Max Operating Temperature: 105°C; Capacitance: 220uF; Tolerance: 20%; Voltage Rating: 50V; Packaging: Tape and Reel; Package Quantity: 1; Voltage Rating (DC): 50V; Termination: SMD/SMT; Voltage: 50V; Features: General Purpose; Series: CD; Construction: Cylindrical; Diameter: 10mm; Length: 10mm; Height: 10mm; Height - Seated (Max): 0.394inch; Radiation Hardening: No; Lead Free: Lead Free; RoHS Compliant: Yes; ComponentLink1URL: https://datasheet.ciiva.com/11776/0900766b80ebdadd-11776792.pdf?src-supplier=RSComponents; ComponentLink1Description: https://datasheet.ciiva.com/11776/0900766b80ebdadd-11776792.pdf?src-supplier=RSComponents; ComponentLink2URL: https://datasheet.ciiva.com/5362/e-cd-22158-5362489.pdf?src-supplier=Mouser; ComponentLink2Description: https://datasheet.ciiva.com/5362/e-cd-22158-5362489.pdf?src-supplier=Mouser; ComponentLink3URL: https://datasheet.ciiva.com/11684/e-cd-11684678.pdf?src-supplier=Avnet; ComponentLink3Description: https://datasheet.ciiva.com/11684/e-cd-11684678.pdf?src-supplier=Avnet; ComponentLink4URL: https://datasheet.ciiva.com/15037/e-cd-15037119.pdf?src-supplier=Digi-Key; ComponentLink4Description: https://datasheet.ciiva.com/15037/e-cd-15037119.pdf?src-supplier=Digi-Key; ComponentLink5URL: https://datasheet.ciiva.com/16393/e-cd-16393493.pdf?src-supplier=Future+Electronics; ComponentLink5Description: https://datasheet.ciiva.com/16393/e-cd-16393493.pdf?src-supplier=Future+Electronics; ComponentLink6URL: https://datasheet.ciiva.com/17354/e-cd-17354606.pdf?src-supplier=Avnet+Europe; ComponentLink6Description: https://datasheet.ciiva.com/17354/e-cd-17354606.pdf?src-supplier=Avnet+Europe; Supplier Part Number 1: 493-6390-1-ND
footprint UCD1H221MNL1GS (CAP ALUM 220UF 20% 50V SMD)
pins: 1, 2

## UMK107B7474KA-TR
designator C?, comment 0.47uF
CAP CER 0.47uF 50V X7R 0603; Manufacturer: Taiyo Yuden; Manufacturer Part Number: UMK107B7474KA-TR; Tolerance: 10%; Capacitance: 470nF; Supplier 1: Digi-Key; RoHS: Yes; Category: Ceramic Capacitors; Stock 1: 81; Pricing 1: 1=0.21000, 10=0.14800, 50=0.08400, 100=0.06950, 500=0.04876, 1000=0.04036 (USD); Mount: Surface Mount; Case/Package: 0603; Case Code (Metric): 1608; Case Code (Imperial): 0603; Min Operating Temperature: -55°C; Max Operating Temperature: 125°C; Packaging: Tape and Reel; Voltage Rating: 50V; Package Quantity: 1; Dielectric: X7R; Termination: SMD/SMT; Voltage: 50V; Series: M; Voltage Rating (DC): 50V; Construction: Flat; Length: 1.6mm; Width: 0.031inch; Height: 0.8mm; Depth: 0.8mm; Thickness: 0.035inch; Radiation Hardening: No; RoHS Compliant: Yes; Lead Free: Lead Free; Halogen Free: Halogen Free; ComponentLink1URL: https://datasheet.ciiva.com/30063/972umk107b7474ka-tr-30063804.pdf?src-supplier=Onlinecomponents.com; ComponentLink1Description: https://datasheet.ciiva.com/30063/972umk107b7474ka-tr-30063804.pdf?src-supplier=Onlinecomponents.com; ComponentLink2URL: https://datasheet.ciiva.com/11600/umk107b7474ka-tr-ss-11600367.pdf?src-supplier=Avnet; ComponentLink2Description: https://datasheet.ciiva.com/11600/umk107b7474ka-tr-ss-11600367.pdf?src-supplier=Avnet; ComponentLink3URL: https://datasheet.ciiva.com/15922/257umk107b7474ka-tr-15922607.pdf?src-supplier=Onlinecomponents.com; ComponentLink3Description: https://datasheet.ciiva.com/15922/257umk107b7474ka-tr-15922607.pdf?src-supplier=Onlinecomponents.com; ComponentLink4URL: https://datasheet.ciiva.com/6274/mlcc-all-e-6274710.pdf?src-supplier=Digi-Key; ComponentLink4Description: https://datasheet.ciiva.com/6274/mlcc-all-e-6274710.pdf?src-supplier=Digi-Key; ComponentLink5URL: https://datasheet.ciiva.com/5412/mlcc01-e-5412119.pdf?src-supplier=Mouser; ComponentLink5Description: https://datasheet.ciiva.com/5412/mlcc01-e-5412119.pdf?src-supplier=Mouser; ComponentLink6URL: https://datasheet.ciiva.com/6274/mlcc-all-e-6274712.pdf?src-supplier=Digi-Key; ComponentLink6Description: https://datasheet.ciiva.com/6274/mlcc-all-e-6274712.pdf?src-supplier=Digi-Key; ComponentLink7URL: https://datasheet.ciiva.com/6274/mlcc-all-e-6274713.pdf?src-supplier=Digi-Key; ComponentLink7Description: https://datasheet.ciiva.com/6274/mlcc-all-e-6274713.pdf?src-supplier=Digi-Key; Supplier Part Number 1: 587-3170-1-ND
footprint Cap0603
pins: 1, 2

## UMK107BBJ225MA-T
designator C?, comment 2.2uF
CAP CER 2.2UF 50V X5R 0603; Manufacturer: Taiyo Yuden; Manufacturer Part Number: UMK107BBJ225MA-T; Supplier 1: Digi-Key; RoHS: Yes; Category: Ceramic Capacitors; Stock 1: 1; Pricing 1: 1=0.26000, 10=0.18100, 50=0.12060, 100=0.10240, 500=0.07232, 1000=0.06327 (USD); RoHS Compliant: Yes; Supplier Part Number 1: 587-6298-1-ND
footprint Cap0603
pins: 1, 2

## VG039NCHXTB222
designator R?, comment 2.2K
2.2kΩ SMD Variable Resistors/Potentiometers ROHS; Manufacturer: HDK; Manufacturer Part Number: VG039NCHXTB222; Footprint: Custom; ComponentLink1Description: LCSC; ComponentLink1URL: https://lcsc.com/product-detail/Variable-Resistors-Potentiometers_HDK-Hokuriku-Elec-Industry-VG039NCHXTB222_C145162.html
footprint VG039NCHXTB222
pins: 1, 2, 3

## VG433SNX39-6W3
designator ANT?
2 433 spring antenna 2.5dBi Vertical 433MHz 50Ω DIP Antennas ROHS; Manufacturer: Vollgo; Manufacturer Part Number: VG433SNX39-6W3; Package: DIP; LCSC Part Number: C718844; ComponentLink1Description: LCSC; ComponentLink1URL: https://www.lcsc.com/product-detail/Antennas_Vollgo-VG433SNX39-6W3_C718844.html
footprint VG433SNX39-6W3
pins: 1 FEED 

## VT1H471MI135000CE0
designator C?, comment 470uF
470uF ±20% 50V 12.5mm 13.5mm 1000hrs 105℃ -40℃~+105℃ SMD,12.5x13.5mm Aluminum Electrolytic Capacitors - SMD RoHS; Manufacturer: Changzhou Huawei Elec; Package: SMD,12.5x13.5mm; Capacitance: 470uF; Tolerance: ±20%; Rated Voltage: 50V; φD: 12.5mm; L: 13.5mm; Lifetime @ Temp: 1000hrs 105℃; Operating Temperature: -40℃~+105℃
footprint VT1H471MI135000CE0 (470uF ±20% 50V 12.5mm 13.5mm 1000hrs 105? -40?~+105? SMD,12.5x13.5mm Aluminum Electrolytic Capacitors - SMD RoHS)
pins: 1, 2

## VZT331M1HTR-1010
designator C?, comment 330uF
50 V 330 uF 105°C 10 x 10 mm SMT Aluminum Electrolytic Capacitor; Manufacturer: Surge Components; Manufacturer Part Number: VZT331M1HTR-1010S; Supplier 1: Future Electronics; RoHS: Yes; Pricing 1: 500=0.42000, 1000=0.40000, 2000=0.38000, 2500=0.36000 (USD); Lead Free: Lead Free; Supplier Part Number 1: 8073945
footprint VZT331M1HTR-1010
pins: 1, 2

## X322512MOB4SI
designator X?, comment 12MHz
12MHz SMD Crystal Resonator 12pF ±10ppm ±30ppm -40℃~+85℃ SMD3225-4P Crystals ROHS; Manufacturer: Yangxing Tech; Manufacturer Part Number: X322512MOB4SI; Value: 12MHz; Footprint: Custom
footprint X322512MOB4SI
pins: 1, 2 GND, 3, 4 GND

## X32251356MSB4SI
designator X?, comment 13.56MHz
13.56MHz SMD Crystal Resonator 20pF ±10ppm ±30ppm -40℃~+85℃ SMD3225-4P Crystals ROHS; Manufacturer: Yangxing Tech; Manufacturer Part Number: X32251356MSB4SI; Value: 13.56MHz; ComponentLink1Description: LCSC; ComponentLink1URL: https://www.lcsc.com/product-detail/Crystals_Yangxing-Tech-X32251356MSB4SI_C21662.html
footprint X32251356MSB4SI
pins: 1, 2 GND, 3, 4 GND

## YS-SBZ9032C03R16
designator LS?
NO 2700Hz 85dB @ 3V, 10cm 3V Φ9mm SMD,9x3.2mm Buzzers RoHS; Manufacturer: Fengming; Operating Voltage: 2 ~ 4V; Package: SMD,9x3.2mm; Frequency - Self Resonant: 2700Hz; Rated Voltage: 3V
footprint YS-SBZ9032C03R16 (NO 2700Hz 85dB @ 3V, 10cm 3V F9mm SMD,9x3.2mm Buzzers RoHS)
pins: 1, 2